# Altium footprint library SON40P150X150X55-9N.PcbLib: 1 footprints
Each footprint in its own frame and in the unit in brackets; x right, y up, seen from the top. Pads: shape width x height; smd on the part's side, far side on the other; paste and mask are expansions set on the pad; w line width, h text height; cw(c..) or ccw(c..) is an arc to the next point about the centre after c.
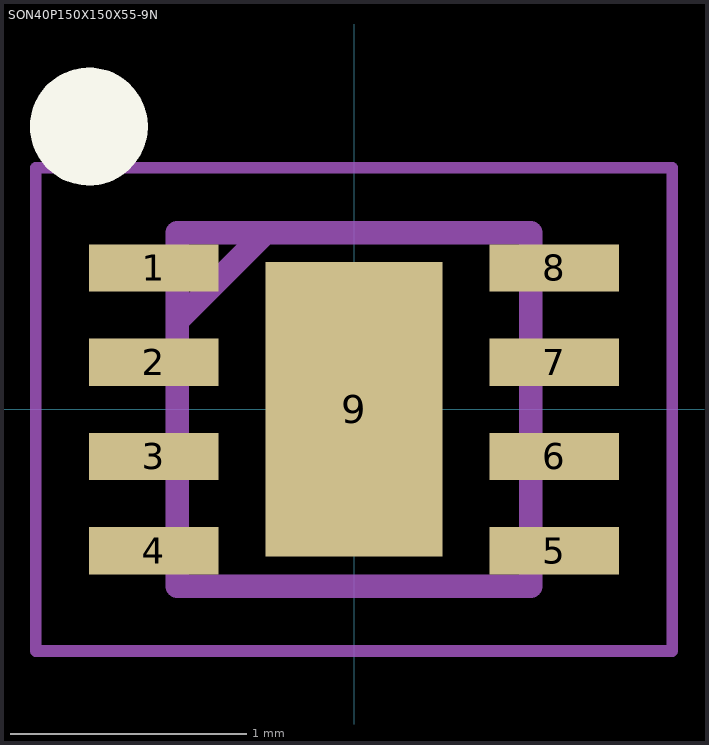
[diagram p0: the footprint, top view; thin cyan lines are the x and y axes]

## SON40P150X150X55-9N [mm]
pads (9):
  rect 0.55x0.2 smd: 1(-0.85,0.6) 2(-0.85,0.2) 3(-0.85,-0.2) 4(-0.85,-0.6) 5(0.85,-0.6) 6(0.85,-0.2) 7(0.85,0.2) 8(0.85,0.6)
  rect 0.75x1.25 smd: 9(0,0)
Top Overlay:
  circle w0.25: c-1.125,1.2 r0.125
Mechanical 15:
  lines w0.1: -0.75,0.375 -0.375,0.75 ; -0.75,-0.75 0.75,-0.75 0.75,0.75 -0.75,0.75 -0.75,-0.75
Mechanical 20:
  lines w0.05: -1.35,-1.025 1.35,-1.025 1.35,1.025 -1.35,1.025 -1.35,-1.025